# EAGLE library part IC_MAX31856 (library dp_devices.v6)
Precision Thermocouple to Digital Converter with Linearization
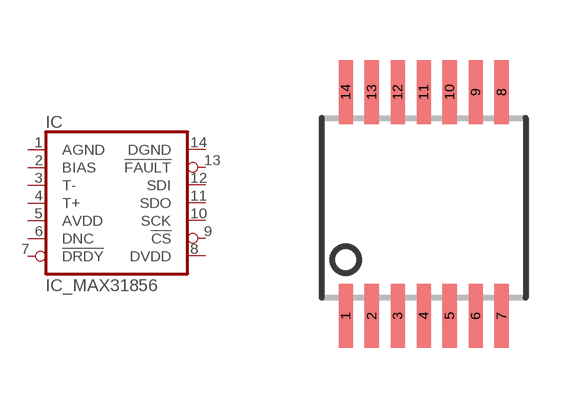
[diagram p194: symbol with the pads of TSSOP-14; footprint TSSOP-14]

Designator prefix IC

## IC_MAX31856  [TSSOP-14]
1  AGND  pwr
2  BIAS
3  T-  in
4  T+  in
5  AVDD  pwr
6  DNC  nc
7  !DRDY  out
8  DVDD  pwr
9  !CS  in
10  SCK  in
11  SDO  out
12  SDI  in
13  !FAULT  out
14  DGND  pwr

## Footprint TSSOP-14 (pad centres in mm)
smd 0.35 x 1.6: 1 -1.95,-2.7; 2 -1.3,-2.7; 3 -0.65,-2.7; 4 0,-2.7; 5 0.65,-2.7; 6 1.3,-2.7; 7 1.95,-2.7; 8 1.95,2.9; 9 1.3,2.9; 10 0.65,2.9; 11 0,2.9; 12 -0.65,2.9; 13 -1.3,2.9; 14 -1.95,2.9